# Altium schematic symbol library Magnetic_Encoder_Sch.SchLib: 2 symbols
Pins are listed as number, name and electrical type; pins without a type are passive.

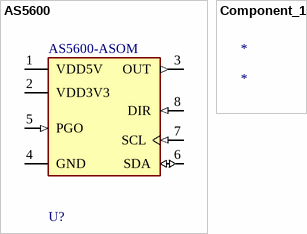
[diagram p0: symbols AS5600 to Component_1]

## AS5600
designator U?, comment AS5600-ASOM
SENSOR ANGLE 360DEG SMD; Sensing Method: Hall Effect; Termination: SMD/SMT; Min Operating Temperature: -40°C; Mount: Surface Mount; Lead Free: Lead Free; Max Operating Temperature: 125°C; ComponentLink1Description: New link
footprint AS5600-ASOM-IPC_A
footprint AS5600-ASOM-IPC_B
footprint AS5600-ASOM-IPC_C
pins: 1 VDD5V (power), 2 VDD3V3 (power), 3 OUT (out), 4 GND (power), 5 PGO (in), 6 SDA (io), 7 SCL (in), 8 DIR (in)

## Component_1
designator *